# Altium schematic symbol library Schlib1.SchLib: 72 symbols (part 1 of 3)
Pins are listed as number, name and electrical type; pins without a type are passive.

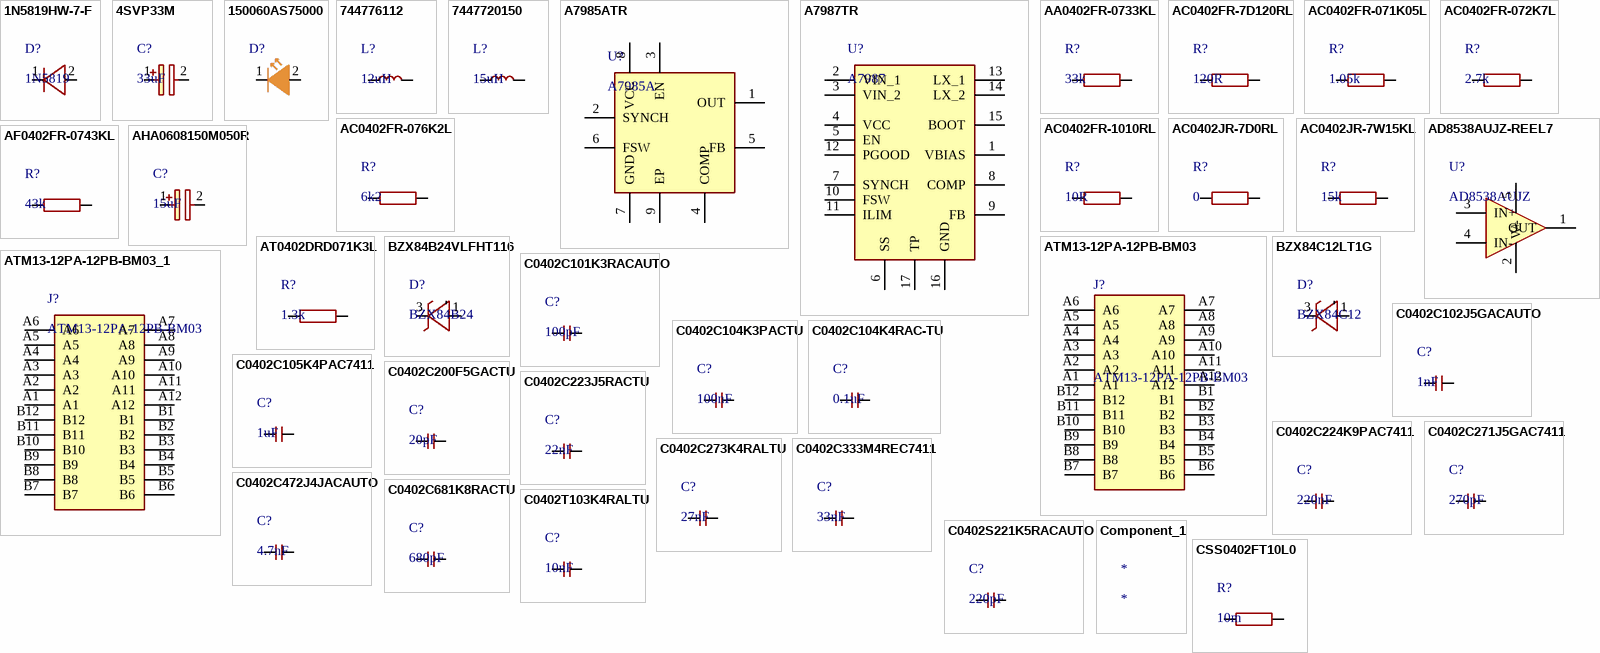
[diagram p0: symbols 1N5819HW-7-F to CSS0402FT10L0]

## 1N5819HW-7-F
designator D?, comment 1N5819
Rectifier Diode, Schottky, 1 Phase, 1 Element, 1A, 40V V(RRM), Silicon; Manufacturer: Diodes; Manufacturer Part Number: 1N5819HW-7-F; Package Body Material: Plastic; Number of Elements: 1; Max Power Dissipation: 450mW; Forward Voltage: 320mV; Non-rep Pk Forward Current-Max: 25A; Time @ Peak Reflow Temperature-Max (s): 40s; Qualification Status: Not Qualified; Supplier: Mouser; Supplier Part Number: 621-1N5819HW-F; RoHS: Yes; Category: Schottky Diodes; Stock: 170615; Pricing: 1=0.25, 10=0.168, 50=0.168, 100=0.121, 1000=0.091, 10000=0.05 (USD); Pins: 2; Diode Element Material: SILICON; Package Shape: Rectangular; Terminal Finish: Tin; Min Operating Temperature: -65°C; Max Operating Temperature: 125°C; Diode Type: RECTIFIER; JESD-30 Code: R-PDSO-G2; Max Output current: 1A; Package Style: SMALL OUTLINEMeter; Rep Pk Reverse Voltage-Max: 40V; Surface Mount: Yes; Technology: SCHOTTKY; Terminal Form: Gull Wing; Terminal Position: DUAL; JESD-609 Code: e3; Moisture Sensitivity Level: 1; Peak Reflow Temperature (Cel): 260°C; Reach SVHC Compliant: Yes; RoHS Compliant: Yes; ComponentLink1URL: https://datasheet.ciiva.com:443/pdfs/VipMasterIC/IC/DIOD/DIOD-S-A0009689747/DIOD-S-A0009691035-1.pdf?src-supplier=IHS+Markit; ComponentLink1Description: https://datasheet.ciiva.com:443/pdfs/VipMasterIC/IC/DIOD/DIOD-S-A0009689747/DIOD-S-A0009691035-1.pdf?src-supplier=IHS+Markit; ComponentLink2URL: https://datasheet.ciiva.com/27092/1538419-27092484.pdf?src-supplier=Jameco; ComponentLink2Description: https://datasheet.ciiva.com/27092/1538419-27092484.pdf?src-supplier=Jameco; ComponentLink3URL: https://datasheet.ciiva.com/16303/ds30217-16303296.pdf?src-supplier=Future+Electronics; ComponentLink3Description: https://datasheet.ciiva.com/16303/ds30217-16303296.pdf?src-supplier=Future+Electronics; ComponentLink4URL: https://datasheet.ciiva.com/1177/ds30217-1177089.pdf?src-supplier=Element14; ComponentLink4Description: https://datasheet.ciiva.com/1177/ds30217-1177089.pdf?src-supplier=Element14; ComponentLink5URL: https://datasheet.ciiva.com/8303/ds30217-8303132.pdf?src-supplier=Avnet; ComponentLink5Description: https://datasheet.ciiva.com/8303/ds30217-8303132.pdf?src-supplier=Avnet; ComponentLink6URL: https://datasheet.ciiva.com/912/ds30217-912802.pdf?src-supplier=Digikey; ComponentLink6Description: https://datasheet.ciiva.com/912/ds30217-912802.pdf?src-supplier=Digikey; ComponentLink7URL: https://datasheet.ciiva.com/912/ds30217-912803.pdf?src-supplier=Digikey; ComponentLink7Description: https://datasheet.ciiva.com/912/ds30217-912803.pdf?src-supplier=Digikey; ComponentLink8URL: https://datasheet.ciiva.com/912/ds30217-912801.pdf?src-supplier=Digikey; ComponentLink8Description: https://datasheet.ciiva.com/912/ds30217-912801.pdf?src-supplier=Digikey
footprint SOD3716X125N
pins: 1 K, 2 A

## 4SVP33M
designator C?, comment 33uF
Aluminum Electrolytic Capacitor, Polarized, Aluminum (solid Polymer), 4V, 20% +Tol, 20% -Tol, 33uF, Surface Mount, 1717; Manufacturer: Panasonic; Manufacturer Part Number: 4SVP33M; Manufacturer Series: SVP; Dielectric Material: Aluminium; ESR (Equivalent Series Resistance): 200mR; Leakage Current: 66uA; Ripple Current: 37mA; Tan Delta: 0.15; Supplier: Mouser; Supplier Part Number: 667-4SVP33M; RoHS: Yes; Category: Aluminum Electrolytic Capacitors; Stock: 1637; Pricing: 1=0.67, 10=0.519, 50=0.519, 100=0.508, 1000=0.44, 10000=0.362 (USD); Mounting Technology: Surface Mount; Pins: 2; Package Shape: Cylindrical; Case/Package: 1717; Min Operating Temperature: -55°C; Max Operating Temperature: 105°C; Polarity: Polarized; Value: 33uF; Capacitor Type: Aluminium; Tolerance  (fill in as +-): 20%; Package Style: SMTMeter; Packaging: Tape and Reel; Tolerance (fill in as +-): 20%; Rated DC Voltage (URdc): 4V; Series: SVP; Termination: Flat; Length: 5mm; Width: 4.3mm; Height: 5.4mm; Reach SVHC Compliant: Yes; RoHS Compliant: Yes; ComponentLink1URL: https://datasheet.ciiva.com:443/pdfs/VipMasterIC/IC/PANA/PANA-S-A0009016943/PANA-S-A0009016943-1.pdf?src-supplier=IHS+Markit; ComponentLink1Description: https://datasheet.ciiva.com:443/pdfs/VipMasterIC/IC/PANA/PANA-S-A0009016943/PANA-S-A0009016943-1.pdf?src-supplier=IHS+Markit; ComponentLink2URL: https://datasheet.ciiva.com/24477/svp-series-datasheet-24477337.pdf?src-supplier=Onlinecomponents.com; ComponentLink2Description: https://datasheet.ciiva.com/24477/svp-series-datasheet-24477337.pdf?src-supplier=Onlinecomponents.com
footprint 10SVPS10M
pins: 1 +, 2

## 150060AS75000
designator D?  (value not drawn)
Single Color LED, Amber, Water Clear, 1.1mm; Manufacturer: Wurth Electronics; Supplier: Digikey; Supplier Part Number: 732-150060AS75000CT-ND; Manufacturer Part Number: 150060AS75000; RoHS: Yes; Category: LEDs; Stock: 19678; Pricing: 1=0.15, 50=0.142, 100=0.122, 500=0.105 (USD); Optoelectronic Device Type: SINGLE COLOR LED; Reach SVHC Compliant: Yes; RoHS Compliant: Yes; ComponentLink1URL: https://datasheet.ciiva.com:443/pdfs/VipMasterIC/IC/MIDC/MIDC-S-A0007768872/MIDC-S-A0007768872-1.pdf?src-supplier=IHS+Markit; ComponentLink1Description: https://datasheet.ciiva.com:443/pdfs/VipMasterIC/IC/MIDC/MIDC-S-A0007768872/MIDC-S-A0007768872-1.pdf?src-supplier=IHS+Markit; ComponentLink2URL: http://www.farnell.com/datasheets/2621639.pdf?src-supplier=Farnell; ComponentLink2Description: http://www.farnell.com/datasheets/2621639.pdf?src-supplier=Farnell; ComponentLink3URL: http://www.farnell.com/datasheets/2621639.pdf?src-supplier=Element14; ComponentLink3Description: http://www.farnell.com/datasheets/2621639.pdf?src-supplier=Element14; ComponentLink4URL: http://www.farnell.com/datasheets/2621639.pdf?src-supplier=Newark; ComponentLink4Description: http://www.farnell.com/datasheets/2621639.pdf?src-supplier=Newark
footprint LED-0603
pins: 1 K, 2 A

## 744776112
designator L?, comment 12uH
General Purpose Inductor, 12uH, 20%, 1 Element, Nickel-zinc Ferrite-Core, SMD, 3935; Manufacturer: Wurth Electronics; Manufacturer Part Number: 744776112; DC Resistance (DCR): 70mR; Inductor Application: POWER INDUCTOR; Channels: 1; Max Current Rating: 2.72A; Shape/Size Description: RECTANGULAR PACKAGE; Shielding: Unshielded; Test Frequency: 1kHz; Self Resonant Frequency: 20MHz; Supplier: Mouser; Supplier Part Number: 710-744776112; RoHS: Yes; Category: Fixed Inductors; Stock: 180; Pricing: 1=2.29, 10=2.22, 50=2.14, 100=2.1, 1000=1.7, 10000=1.7 (USD); Pins: 2; Terminal Finish: Copper; Core Material: Ferrite; Min Operating Temperature: -40°C; Max Operating Temperature: 125°C; Tolerance: 20%; JESD-609 Code: e1; Inductance-Nom (L): 12uH; Inductor Type: GENERAL PURPOSE INDUCTOR; Surface Mount: Yes; Terminal Placement: Dual Ended; Termination: One Surface; Reach SVHC Compliant: Yes; RoHS Compliant: Yes; ComponentLink1URL: https://datasheet.ciiva.com:443/pdfs/VipMasterIC/IC/MIDC/MIDC-S-A0009028210/MIDC-S-A0009028303-1.pdf?src-supplier=IHS+Markit; ComponentLink1Description: https://datasheet.ciiva.com:443/pdfs/VipMasterIC/IC/MIDC/MIDC-S-A0009028210/MIDC-S-A0009028303-1.pdf?src-supplier=IHS+Markit; ComponentLink2URL: https://datasheet.ciiva.com/1063/744776112-1063302.pdf?src-supplier=Digikey; ComponentLink2Description: https://datasheet.ciiva.com/1063/744776112-1063302.pdf?src-supplier=Digikey; ComponentLink3URL: https://datasheet.ciiva.com/6696/744776112-6696301.pdf?src-supplier=Digikey; ComponentLink3Description: https://datasheet.ciiva.com/6696/744776112-6696301.pdf?src-supplier=Digikey; ComponentLink4URL: https://datasheet.ciiva.com/4954/744776112-37936-4954902.pdf?src-supplier=Mouser; ComponentLink4Description: https://datasheet.ciiva.com/4954/744776112-37936-4954902.pdf?src-supplier=Mouser; ComponentLink5URL: https://datasheet.ciiva.com/7892/1736454-7892919.pdf?src-supplier=Element14; ComponentLink5Description: https://datasheet.ciiva.com/7892/1736454-7892919.pdf?src-supplier=Element14; ComponentLink6URL: https://datasheet.ciiva.com/6696/744776112-6696300.pdf?src-supplier=Digikey; ComponentLink6Description: https://datasheet.ciiva.com/6696/744776112-6696300.pdf?src-supplier=Digikey
footprint WE-PD2_105455
pins: 1, 2

## 7447720150
designator L?, comment 15uH
Data Line Filter, 1 Function(s), 2.4A; Manufacturer: Wurth Electronics; Manufacturer Part Number: 7447720150; DC Resistance-Max: 45mR; Channels: 1; Supplier: Mouser; Supplier Part Number: 710-7447720150; RoHS: Yes; Category: Fixed Inductors; Stock: 282; Pricing: 1=1.02, 10=0.969, 50=0.903, 100=0.819, 1000=0.735, 10000=0.732 (USD); Mounting Technology: Through Hole; Terminal Finish: Copper; Min Operating Temperature: -40°C; Max Operating Temperature: 125°C; JESD-609 Code: e2; Filter Type: DATA LINE FILTER; Value: 15uH; Current Rating: 2.4A; Diameter: 7.8mm; Height: 9.5mm; Reach SVHC Compliant: Yes; RoHS Compliant: Yes; ComponentLink1URL: https://datasheet.ciiva.com:443/pdfs/VipMasterIC/IC/MIDC/MIDC-S-A0003256981/MIDC-S-A0003256981-1.pdf?src-supplier=IHS+Markit; ComponentLink1Description: https://datasheet.ciiva.com:443/pdfs/VipMasterIC/IC/MIDC/MIDC-S-A0003256981/MIDC-S-A0003256981-1.pdf?src-supplier=IHS+Markit; ComponentLink2URL: https://datasheet.ciiva.com/23792/1646008-23792069.pdf?src-supplier=Newark; ComponentLink2Description: https://datasheet.ciiva.com/23792/1646008-23792069.pdf?src-supplier=Newark; ComponentLink3URL: https://datasheet.ciiva.com/7695/1736325-7695866.pdf?src-supplier=Element14; ComponentLink3Description: https://datasheet.ciiva.com/7695/1736325-7695866.pdf?src-supplier=Element14; ComponentLink4URL: https://datasheet.ciiva.com/1060/7447720150-1060860.pdf?src-supplier=Digikey; ComponentLink4Description: https://datasheet.ciiva.com/1060/7447720150-1060860.pdf?src-supplier=Digikey
footprint WE-TI_809589
pins: 1, 2

## A7985ATR
designator U?, comment A7985A
Switching Regulator, Voltage-mode, 3.5A, 275kHz Switching Freq-Max, PDSO8; Manufacturer: STMicroelectronics; Manufacturer Part Number: A7985ATR; Package Body Material: Plastic; Package Equivalence Code: SOP8,.25; Control Technique: PULSE WIDTH MODULATION; Max Supply Voltage: 38V; Min Input Voltage: 4.5V; Nominal Supply Voltage: 12V; Channels: 1; Switcher Configuration: BUCK; Qualification Status: Not Qualified; Supplier: Mouser; Supplier Part Number: 511-A7985ATR; RoHS: Yes; Category: Voltage Regulators - Switching; Stock: 5225; Pricing: 1=1.76, 10=1.51, 50=1.42, 100=1.34, 1000=1.24, 10000=1.1 (USD); Case/Package: HLSOP; Pins: 8; Package Shape: Rectangular; Terminal Finish: Tin; Min Operating Temperature: -40°C; Max Operating Temperature: 125°C; Throw Configuration: SWITCHING REGULATOR; Control Mode: VOLTAGE-MODE; JESD-30 Code: R-PDSO-G8; Max Output current: 3.5A; Package Style: SMALL OUTLINE, HEAT SINK/SLUG, LOW PROFILEMeter; Surface Mount: Yes; Frequency: 275kHz; Terminal Form: Gull Wing; Terminal Position: DUAL; JESD-609 Code: e3; Moisture Sensitivity Level: 3; Length: 4.9mm; Width: 3.9mm; Terminal Pitch: 1.27mm; Height - Seated (Max): 1.7mm; Reach SVHC Compliant: Yes; RoHS Compliant: Yes; Temperature Grade: AUTOMOTIVE; ComponentLink1URL: https://datasheet.ciiva.com:443/pdfs/VipMasterIC/IC/SGST/SGST-S-A0002908266/SGST-S-A0002908266-1.pdf?src-supplier=IHS+Markit; ComponentLink1Description: https://datasheet.ciiva.com:443/pdfs/VipMasterIC/IC/SGST/SGST-S-A0002908266/SGST-S-A0002908266-1.pdf?src-supplier=IHS+Markit; ComponentLink2URL: https://datasheet.ciiva.com/41458/001184805-da-01-en-ic-reg-buck-adj-2a-a7985atr-soic-8-stm-41458161.pdf?src-supplier=Conrad; ComponentLink2Description: https://datasheet.ciiva.com/41458/001184805-da-01-en-ic-reg-buck-adj-2a-a7985atr-soic-8-stm-41458161.pdf?src-supplier=Conrad; ComponentLink3URL: https://datasheet.ciiva.com/6603/dm00053375-6603398.pdf?src-supplier=Digikey; ComponentLink3Description: https://datasheet.ciiva.com/6603/dm00053375-6603398.pdf?src-supplier=Digikey; ComponentLink4URL: https://datasheet.ciiva.com/6603/dm00053375-6603399.pdf?src-supplier=Digikey; ComponentLink4Description: https://datasheet.ciiva.com/6603/dm00053375-6603399.pdf?src-supplier=Digikey; ComponentLink5URL: https://datasheet.ciiva.com/6603/dm00053375-6603401.pdf?src-supplier=Digikey; ComponentLink5Description: https://datasheet.ciiva.com/6603/dm00053375-6603401.pdf?src-supplier=Digikey
footprint SOIC127P600X170-9N
pins: 1 OUT, 2 SYNCH, 3 EN, 4 COMP, 5 FB, 6 FSW, 7 GND, 8 VCC, 9 EP

## A7987TR
designator U?, comment A7987
Switching Regulator, Voltage-mode, 4.4A, 1650kHz Switching Freq-Max, PDSO16; Manufacturer: STMicroelectronics; Manufacturer Part Number: A7987TR; Supplier: Mouser; Supplier Part Number: 511-A7987TR; RoHS: Yes; Category: Voltage Regulators - Switching; Stock: 4709; Pricing: 1=5.04, 10=3.84, 50=3.54, 100=3.21, 1000=2.88, 10000=2.58 (USD); RoHS Compliant: Yes; ComponentLink1URL: https://www.st.com/resource/en/datasheet/a7987.pdf?src-supplier=Digikey; ComponentLink1Description: https://www.st.com/resource/en/datasheet/a7987.pdf?src-supplier=Digikey; ComponentLink2URL: https://datasheet.octopart.com/A7987TR-STMicroelectronics-datasheet-153441496.pdf?src-supplier=Element14; ComponentLink2Description: https://datasheet.octopart.com/A7987TR-STMicroelectronics-datasheet-153441496.pdf?src-supplier=Element14
footprint SOP65P640X120-17N
pins: 1 VBIAS, 2 VIN_1, 3 VIN_2, 4 VCC, 5 EN, 6 SS, 7 SYNCH, 8 COMP, 9 FB, 10 FSW, 11 ILIM, 12 PGOOD, 13 LX_1, 14 LX_2, 15 BOOT, 16 GND, 17 TP

## AA0402FR-0733KL
designator R?, comment 33k
Fixed Resistor, Metal Glaze/thick Film, 0.0625W, 33000ohm, 50V, 1% +/-Tol, 150ppm/Cel, Surface Mount, 0402; Manufacturer: Yageo; Manufacturer Part Number: AA0402FR-0733KL; Additional Feature: LASER TRIMMABLE; Power: 62.5mW; Rated Temperature: 70°C; Value: 33kR; Temperature Coefficient (ppm/Cel): 150; Package Height: 0.32mm; Package Length: 1mm; Package Width: 0.5mm; Reference Standard: AEC-Q200; Supplier: Mouser; Supplier Part Number: 603-AA0402FR-0733KL; RoHS: Yes; Category: Chip SMD Resistors; Stock: 7647; Pricing: 1=0.11, 10=0.019, 50=0.019, 100=0.017, 1000=0.013, 10000=0.005 (USD); Mounting Technology: Surface Mount; Pins: 2; Package Shape: Rectangular; Case/Package: 0402; Terminal Finish: Nickel; Min Operating Temperature: -55°C; Max Operating Temperature: 155°C; Tolerance: 1%; JESD-609 Code: e3; Resistor Type: FIXED RESISTOR; Construction: Chip; Packaging: Tape and Reel; Technology: METAL GLAZE/THICK FILM; Termination: Wraparound; Working Voltage: 50V; Reach SVHC Compliant: Yes; RoHS Compliant: Yes; ComponentLink1URL: https://datasheet.ciiva.com:443/pdfs/VipMasterIC/IC/YAGO/YAGO-S-A0003674169/YAGO-S-A0003674169-1.pdf?src-supplier=IHS+Markit; ComponentLink1Description: https://datasheet.ciiva.com:443/pdfs/VipMasterIC/IC/YAGO/YAGO-S-A0003674169/YAGO-S-A0003674169-1.pdf?src-supplier=IHS+Markit; ComponentLink2URL: http://www.yageo.com/NewPortal/yageodocoutput?fileName=/pdf/R-Chip/PYu-AA_51_RoHS_L_3.pdf&src-supplier=Digikey; ComponentLink2Description: http://www.yageo.com/NewPortal/yageodocoutput?fileName=/pdf/R-Chip/PYu-AA_51_RoHS_L_3.pdf&src-supplier=Digikey
footprint R0402
pins: 1, 2

## AC0402FR-7D120RL
designator R?, comment 120R
Fixed Resistor, Metal Glaze/thick Film, 0.0625W, 120ohm, 50V, 1% +/-Tol, -100,100ppm/Cel, 0402; Manufacturer: Yageo; Manufacturer Part Number: AC0402FR-7D120RL; Power: 62.5mW; Package Height: 0.32mm; Package Length: 1mm; Package Width: 0.5mm; Reference Standard: AEC-Q200; Supplier: Mouser; Supplier Part Number: 603-AC0402FR-7D120RL; RoHS: Yes; Category: Chip SMD Resistors; Stock: 13078; Pricing: 1=0.14, 10=0.014, 50=0.014, 100=0.009, 1000=0.008, 10000=0.004 (USD); Pins: 2; Case/Package: 0402; Terminal Finish: Nickel; Min Operating Temperature: -55°C; Max Operating Temperature: 155°C; Tolerance: 1%; JESD-609 Code: e3; Resistor Type: FIXED RESISTOR; Construction: Chip; Packaging: Tape and Reel; Value: 120R; Series: AC; Technology: METAL GLAZE/THICK FILM; Working Voltage: 50V; Temperature Coefficient (ppm/Cel): -100,100; Reach SVHC Compliant: Yes; RoHS Compliant: Yes; ComponentLink1URL: https://datasheet.ciiva.com:443/pdfs/VipMasterIC/IC/YAGO/YAGOS02581/YAGOS02581-1.pdf?src-supplier=IHS+Markit; ComponentLink1Description: https://datasheet.ciiva.com:443/pdfs/VipMasterIC/IC/YAGO/YAGOS02581/YAGOS02581-1.pdf?src-supplier=IHS+Markit
footprint R0402
pins: 1, 2

## AC0402FR-071K05L
designator R?, comment 1.05k
Fixed Resistor, Metal Glaze/thick Film, 0.0625W, 1050ohm, 50V, 1% +/-Tol, 100ppm/Cel, Surface Mount, 0402; Manufacturer: Yageo; Manufacturer Part Number: AC0402FR-071K05L; Additional Feature: LASER TRIMMABLE; Power: 62.5mW; Rated Temperature: 70°C; Value: 1.05kR; Temperature Coefficient (ppm/Cel): 100; Package Height: 0.32mm; Package Length: 1mm; Package Width: 0.5mm; Reference Standard: AEC-Q200; Supplier: Mouser; Supplier Part Number: 603-AC0402FR-071K05L; RoHS: Yes; Category: Chip SMD Resistors; Stock: 33067; Pricing: 1=0.1, 10=0.005, 50=0.005, 100=0.005, 1000=0.005, 10000=0.002 (USD); Mounting Technology: Surface Mount; Pins: 2; Package Shape: Rectangular; Case/Package: 0402; Terminal Finish: Nickel; Min Operating Temperature: -55°C; Max Operating Temperature: 155°C; Tolerance: 1%; JESD-609 Code: e3; Resistor Type: FIXED RESISTOR; Construction: Chip; Packaging: Tape and Reel; Technology: METAL GLAZE/THICK FILM; Termination: Wraparound; Working Voltage: 50V; Reach SVHC Compliant: Yes; RoHS Compliant: Yes; ComponentLink1URL: https://datasheet.ciiva.com:443/pdfs/VipMasterIC/IC/YAGO/YAGO-S-A0003597364/YAGO-S-A0003597364-1.pdf?src-supplier=IHS+Markit; ComponentLink1Description: https://datasheet.ciiva.com:443/pdfs/VipMasterIC/IC/YAGO/YAGO-S-A0003597364/YAGO-S-A0003597364-1.pdf?src-supplier=IHS+Markit; ComponentLink2URL: http://www.yageo.com/NewPortal/yageodocoutput?fileName=/pdf/R-Chip/PYu-AC_51_RoHS_L_6.pdf&src-supplier=Digikey; ComponentLink2Description: http://www.yageo.com/NewPortal/yageodocoutput?fileName=/pdf/R-Chip/PYu-AC_51_RoHS_L_6.pdf&src-supplier=Digikey
footprint R0402
pins: 1, 2

## AC0402FR-072K7L
designator R?, comment 2.7k
Fixed Resistor, Metal Glaze/thick Film, 0.0625W, 2700ohm, 50V, 1% +/-Tol, 100ppm/Cel, Surface Mount, 0402; Manufacturer: Yageo; Manufacturer Part Number: AC0402FR-072K7L; Additional Feature: LASER TRIMMABLE; Power: 62.5mW; Rated Temperature: 70°C; Value: 2.7kR; Temperature Coefficient (ppm/Cel): 100; Package Height: 0.32mm; Package Length: 1mm; Package Width: 0.5mm; Reference Standard: AEC-Q200; Supplier: Mouser; Supplier Part Number: 603-AC0402FR-072K7L; RoHS: Yes; Category: Chip SMD Resistors; Stock: 89734; Pricing: 1=0.1, 10=0.009, 50=0.009, 100=0.007, 1000=0.005, 10000=0.002 (USD); Mounting Technology: Surface Mount; Pins: 2; Package Shape: Rectangular; Case/Package: 0402; Terminal Finish: Nickel; Min Operating Temperature: -55°C; Max Operating Temperature: 155°C; Tolerance: 1%; JESD-609 Code: e3; Resistor Type: FIXED RESISTOR; Construction: Chip; Packaging: Tape and Reel; Technology: METAL GLAZE/THICK FILM; Termination: Wraparound; Working Voltage: 50V; Reach SVHC Compliant: Yes; RoHS Compliant: Yes; ComponentLink1URL: https://datasheet.ciiva.com:443/pdfs/VipMasterIC/IC/YAGO/YAGO-S-A0003597364/YAGO-S-A0003597364-1.pdf?src-supplier=IHS+Markit; ComponentLink1Description: https://datasheet.ciiva.com:443/pdfs/VipMasterIC/IC/YAGO/YAGO-S-A0003597364/YAGO-S-A0003597364-1.pdf?src-supplier=IHS+Markit; ComponentLink2URL: https://datasheet.ciiva.com/12576/pyu-ac-51-rohs-l-2-12576316.pdf?src-supplier=Mouser; ComponentLink2Description: https://datasheet.ciiva.com/12576/pyu-ac-51-rohs-l-2-12576316.pdf?src-supplier=Mouser
footprint R0402
pins: 1, 2

## AC0402FR-076K2L
designator R?, comment 6k2
Fixed Resistor, Metal Glaze/thick Film, 0.0625W, 6200ohm, 50V, 1% +/-Tol, 100ppm/Cel, Surface Mount, 0402; Manufacturer: Yageo; Manufacturer Part Number: AC0402FR-076K2L; Additional Feature: LASER TRIMMABLE; Power: 62.5mW; Rated Temperature: 70°C; Value: 6.2kR; Temperature Coefficient (ppm/Cel): 100; Package Height: 0.32mm; Package Length: 1mm; Package Width: 0.5mm; Reference Standard: AEC-Q200; Supplier: Mouser; Supplier Part Number: 603-AC0402FR-076K2L; RoHS: Yes; Category: Chip SMD Resistors; Stock: 418682; Pricing: 1=0.1, 10=0.009, 50=0.009, 100=0.007, 1000=0.006, 10000=0.002 (USD); Mounting Technology: Surface Mount; Pins: 2; Package Shape: Rectangular; Case/Package: 0402; Terminal Finish: Nickel; Min Operating Temperature: -55°C; Max Operating Temperature: 155°C; Tolerance: 1%; JESD-609 Code: e3; Resistor Type: FIXED RESISTOR; Construction: Chip; Packaging: Tape and Reel; Technology: METAL GLAZE/THICK FILM; Termination: Wraparound; Working Voltage: 50V; Reach SVHC Compliant: Yes; RoHS Compliant: Yes; ComponentLink1URL: https://datasheet.ciiva.com:443/pdfs/VipMasterIC/IC/YAGO/YAGO-S-A0003597364/YAGO-S-A0003597364-1.pdf?src-supplier=IHS+Markit; ComponentLink1Description: https://datasheet.ciiva.com:443/pdfs/VipMasterIC/IC/YAGO/YAGO-S-A0003597364/YAGO-S-A0003597364-1.pdf?src-supplier=IHS+Markit; ComponentLink2URL: https://datasheet.octopart.com/AC0402FR-076K2L-Yageo-datasheet-151884373.pdf?src-supplier=Future+Electronics; ComponentLink2Description: https://datasheet.octopart.com/AC0402FR-076K2L-Yageo-datasheet-151884373.pdf?src-supplier=Future+Electronics; ComponentLink3URL: http://www.yageo.com/NewPortal/yageodocoutput?fileName=/pdf/R-Chip/PYu-AC_51_RoHS_L_6.pdf&src-supplier=Digikey; ComponentLink3Description: http://www.yageo.com/NewPortal/yageodocoutput?fileName=/pdf/R-Chip/PYu-AC_51_RoHS_L_6.pdf&src-supplier=Digikey; ComponentLink4URL: https://www.yageo.com/upload/media/product/productsearch/datasheet/rchip/PYu-AC_51_RoHS_L_7.pdf?src-supplier=Digikey; ComponentLink4Description: https://www.yageo.com/upload/media/product/productsearch/datasheet/rchip/PYu-AC_51_RoHS_L_7.pdf?src-supplier=Digikey; ComponentLink5URL: http://www.yageo.com/documents/recent/PYu-AC_51_RoHS_L_2_revised.pdf?src-supplier=Future+Electronics; ComponentLink5Description: http://www.yageo.com/documents/recent/PYu-AC_51_RoHS_L_2_revised.pdf?src-supplier=Future+Electronics
footprint R0402
pins: 1, 2

## AC0402FR-1010RL
designator R?, comment 10R
Fixed Resistor, Metal Glaze/thick Film, 0.0625W, 10ohm, 50V, 1% +/-Tol, 200ppm/Cel, Surface Mount, 0402; Manufacturer: Yageo; Manufacturer Part Number: AC0402FR-1010RL; Additional Feature: LASER TRIMMABLE; Power: 62.5mW; Rated Temperature: 70°C; Temperature Coefficient (ppm/Cel): 200; Package Height: 0.32mm; Package Length: 1mm; Package Width: 0.5mm; Reference Standard: AEC-Q200; Supplier: Mouser; Supplier Part Number: 603-AC0402FR-1010RL; RoHS: Yes; Category: Chip SMD Resistors; Stock: 136743; Pricing: 1=0.18, 10=0.018, 50=0.018, 100=0.012, 1000=0.01, 10000=0.005 (USD); Mounting Technology: Surface Mount; Pins: 2; Package Shape: Rectangular; Case/Package: 0402; Terminal Finish: Nickel; Min Operating Temperature: -55°C; Max Operating Temperature: 155°C; Tolerance: 1%; JESD-609 Code: e3; Resistor Type: FIXED RESISTOR; Construction: Chip; Packaging: Tape and Reel; Value: 10R; Technology: METAL GLAZE/THICK FILM; Termination: Wraparound; Working Voltage: 50V; Reach SVHC Compliant: Yes; RoHS Compliant: Yes; ComponentLink1URL: https://datasheet.ciiva.com:443/pdfs/VipMasterIC/IC/YAGO/YAGO-S-A0003597364/YAGO-S-A0003597364-1.pdf?src-supplier=IHS+Markit; ComponentLink1Description: https://datasheet.ciiva.com:443/pdfs/VipMasterIC/IC/YAGO/YAGO-S-A0003597364/YAGO-S-A0003597364-1.pdf?src-supplier=IHS+Markit
footprint R0402
pins: 1, 2

## AC0402JR-7D0RL
designator R?, comment 0
Fixed Resistor, Metal Glaze/thick Film, 0.0625W, 0ohm, Surface Mount, 0402; Manufacturer: Yageo; Manufacturer Part Number: AC0402JR-7D0RL; Supplier: Mouser; Supplier Part Number: 603-AC0402JR-7D0RL; RoHS: Yes; Category: Resistors; Stock: 155617; Pricing: 1=0.14, 10=0.014, 50=0.014, 100=0.009, 1000=0.008, 10000=0.004 (USD)
footprint R0402
pins: 1, 2

## AC0402JR-7W15KL
designator R?, comment 15k
Chip Resistor Automotive Grade Thick Film 0402 15kOhm 5% Paper T/R; Manufacturer: Yageo; Manufacturer Part Number: AC0402JR-7W15KL; Supplier: Mouser; Supplier Part Number: 603-AC0402JR-7W15KL; RoHS: No; Category: Chip SMD Resistors; Stock: 9990; Pricing: 1=0.15, 10=0.015, 50=0.015, 100=0.01, 1000=0.008, 10000=0.003 (USD)
footprint R0402
pins: 1, 2

## AD8538AUJZ-REEL7
designator U?, comment AD8538AUJZ
Operational Amplifier, 1 Func, 30uV Offset-Max, CMOS, PDSO5; Manufacturer: Analog Devices; Manufacturer Part Number: AD8538AUJZ-REEL7; Package Body Material: Plastic; Architecture: VOLTAGE-FEEDBACK; Average Bias Current-Max (IIB): 100pA; Bias Current-Max (IIB) @25C: 25pA; Common-mode Reject Ratio-Nom: 135dB; Frequency Compensation: YES; Neg Supply Voltage Limit-Max: 0V; Channels: 1; Package Equivalence Code: TSOP5/6,.11,37; Power: No; Power Supplies: +-1.35/+-2.5/2.7/5V; Slew Rate: 0.4V/µs; Max Supply Current: 215uA; Supply Voltage Limit-Max: 6V; Nominal Supply Voltage: 5V; Time @ Peak Reflow Temperature-Max (s): 40s; Unity Gain BW-Nom: 430kHz; Voltage Gain-Min: 178000; Qualification Status: Not Qualified; Supplier: Mouser; Supplier Part Number: 584-AD8538AUJZ-R7; RoHS: Yes; Category: Amplifiers - Op Amps, Buffer, Instrumentation; Stock: 130448; Pricing: 1=1.65, 10=1.42, 50=1.42, 100=1.25, 1000=0.916, 10000=0.84 (USD); Case/Package: VSSOP; Pins: 5; Package Shape: Rectangular; Terminal Finish: Tin; Min Operating Temperature: -40°C; Max Operating Temperature: 125°C; JESD-609 Code: e3; Amplifier Type: OPERATIONAL AMPLIFIER; Input Offset Voltage-Max: 30uV; JESD-30 Code: R-PDSO-G5; Low-Bias: Yes; Low-Offset: Yes; Micropower: Yes; Moisture Sensitivity Level: 1; Neg Supply Voltage-Nom (Vsup): 0V; Package Style: SMALL OUTLINE, VERY THIN PROFILE, SHRINK PITCHMeter; Packaging: Tape and Reel; Peak Reflow Temperature (Cel): 260°C; Programmable Power: No; Surface Mount: Yes; Technology: CMOS; Terminal Form: Gull Wing; Terminal Position: DUAL; Wideband: No; Length: 2.9mm; Width: 1.6mm; Height - Seated (Max): 1mm; Terminal Pitch: 0.95mm; Temperature Grade: AUTOMOTIVE; Reach SVHC Compliant: Yes; RoHS Compliant: Yes; ComponentLink1URL: https://datasheet.ciiva.com:443/pdfs/VipMasterIC/IC/ANDI/ANDIS13894/ANDIS13894-1.pdf?src-supplier=IHS+Markit; ComponentLink1Description: https://datasheet.ciiva.com:443/pdfs/VipMasterIC/IC/ANDI/ANDIS13894/ANDIS13894-1.pdf?src-supplier=IHS+Markit; ComponentLink2URL: https://datasheet.ciiva.com/15374/ad8538-8539-243268-15374656.pdf?src-supplier=Mouser; ComponentLink2Description: https://datasheet.ciiva.com/15374/ad8538-8539-243268-15374656.pdf?src-supplier=Mouser; ComponentLink3URL: https://datasheet.ciiva.com/2974/ad8538-8539-2974672.pdf?src-supplier=Avnet; ComponentLink3Description: https://datasheet.ciiva.com/2974/ad8538-8539-2974672.pdf?src-supplier=Avnet; ComponentLink4URL: https://datasheet.ciiva.com/1793/ad8538-8539-1793940.pdf?src-supplier=Digikey; ComponentLink4Description: https://datasheet.ciiva.com/1793/ad8538-8539-1793940.pdf?src-supplier=Digikey; ComponentLink5URL: https://datasheet.ciiva.com/1793/ad8538-8539-1793941.pdf?src-supplier=Digikey; ComponentLink5Description: https://datasheet.ciiva.com/1793/ad8538-8539-1793941.pdf?src-supplier=Digikey; ComponentLink6URL: https://datasheet.ciiva.com/1793/ad8538-8539-1793942.pdf?src-supplier=Digikey; ComponentLink6Description: https://datasheet.ciiva.com/1793/ad8538-8539-1793942.pdf?src-supplier=Digikey; ComponentLink7URL: https://datasheet.ciiva.com/2973/ad8538-8539-2973062.pdf?src-supplier=Avnet; ComponentLink7Description: https://datasheet.ciiva.com/2973/ad8538-8539-2973062.pdf?src-supplier=Avnet
footprint SOT95P280X100-5N
pins: 1 OUT, 2 V-, 3 IN+, 4 IN-, 5 V+

## AF0402FR-0743KL
designator R?, comment 43k
Fixed Resistor, Metal Glaze/thick Film, 0.0625W, 43000ohm, 50V, 1% +/-Tol, 100ppm/Cel, Surface Mount, 0402; Manufacturer: Yageo; Manufacturer Part Number: AF0402FR-0743KL; Additional Feature: ANTI-SULFUR; Power: 62.5mW; Rated Temperature: 70°C; Value: 43kR; Temperature Coefficient (ppm/Cel): 100; Package Height: 0.32mm; Package Length: 1mm; Package Width: 0.5mm; Reference Standard: AEC-Q200; Supplier: Mouser; Supplier Part Number: 603-AF0402FR-0743KL; RoHS: Yes; Category: Chip SMD Resistors; Stock: 9222; Pricing: 1=0.1, 10=0.022, 50=0.022, 100=0.016, 1000=0.012, 10000=0.006 (USD); Mounting Technology: Surface Mount; Pins: 2; Case/Package: 0402; Min Operating Temperature: -55°C; Max Operating Temperature: 155°C; Tolerance: 1%; Resistor Type: FIXED RESISTOR; Construction: Rectangular; Packaging: Tape and Reel; Termination: Wraparound; Working Voltage: 50V; Reach SVHC Compliant: Yes; RoHS Compliant: Yes; ComponentLink1URL: https://datasheet.ciiva.com:443/pdfs/VipMasterIC/IC/YAGO/YAGO-S-A0009016998/YAGO-S-A0009016998-1.pdf?src-supplier=IHS+Markit; ComponentLink1Description: https://datasheet.ciiva.com:443/pdfs/VipMasterIC/IC/YAGO/YAGO-S-A0009016998/YAGO-S-A0009016998-1.pdf?src-supplier=IHS+Markit; ComponentLink2URL: http://www.yageo.com/documents/recent/PYu-AF_51_RoHS_L_5.pdf?src-supplier=Digikey; ComponentLink2Description: http://www.yageo.com/documents/recent/PYu-AF_51_RoHS_L_5.pdf?src-supplier=Digikey
footprint R0402
pins: 1, 2

## AHA0608150M050R
designator C?, comment 15uF
Hybrid Aluminum V-Chip, 15uF, 50V | AVX AHA0608150M050R; Manufacturer: Kyocera AVX; Supplier: Mouser; Supplier Part Number: 581-AHA0608150M050R; Manufacturer Part Number: AHA0608150M050R; RoHS: No; Category: Polymer Capacitors; Stock: 134; Pricing: 1=0.93, 10=0.586, 50=0.586, 100=0.582, 1000=0.494, 10000=0.262 (USD)
footprint CAPAE660X850N
pins: 1 +, 2

## AT0402DRD071K3L
designator R?, comment 1.3k
Fixed Resistor, Thin Film, 0.0625W, 1300ohm, 50V, 0.5% +/-Tol, 25ppm/Cel, Surface Mount, 0402; Manufacturer: Yageo; Manufacturer Part Number: AT0402DRD071K3L; Additional Feature: HIGH PRECISION; Power: 62.5mW; Rated Temperature: 70°C; Value: 1.3kR; Temperature Coefficient (ppm/Cel): 25; Package Height: 0.3mm; Package Length: 1mm; Package Width: 0.5mm; Reference Standard: AEC-Q200; Supplier: Mouser; Supplier Part Number: 603-AT0402DRD071K3L; RoHS: Yes; Category: Chip SMD Resistors; Stock: 5742; Pricing: 1=0.14, 10=0.102, 50=0.082, 100=0.073, 1000=0.05, 10000=0.031 (USD); Mounting Technology: Surface Mount; Pins: 2; Package Shape: Rectangular; Case/Package: 0402; Min Operating Temperature: -55°C; Max Operating Temperature: 155°C; Tolerance: 0.5%; Resistor Type: FIXED RESISTOR; Construction: Chip; Packaging: Tape and Reel; Technology: THIN FILM; Termination: Wraparound; Working Voltage: 50V; Reach SVHC Compliant: Yes; RoHS Compliant: Yes; ComponentLink1URL: https://datasheet.ciiva.com:443/pdfs/VipMasterIC/IC/YAGO/YAGO-S-A0003527576/YAGO-S-A0003527576-1.pdf?src-supplier=IHS+Markit; ComponentLink1Description: https://datasheet.ciiva.com:443/pdfs/VipMasterIC/IC/YAGO/YAGO-S-A0003527576/YAGO-S-A0003527576-1.pdf?src-supplier=IHS+Markit; ComponentLink2URL: http://www.yageo.com/documents/recent/PYu-AT_51_RoHS_L-3.pdf?src-supplier=Digikey; ComponentLink2Description: http://www.yageo.com/documents/recent/PYu-AT_51_RoHS_L-3.pdf?src-supplier=Digikey
footprint R0402
pins: 1, 2

## ATM13-12PA-12PB-BM03
designator J?
AMPHENOL SINE/TUCHEL - ATM13-12PA-12PB-BM03 - ATM HEADER  (2) 12 POSITION SIZE 20, A&B KEY  - TIN PLATING 98AC7190; Geometry.Height: 35.4mm; Manufacturer_Name: Amphenol; Manufacturer_Part_Number: ATM13-12PA-12PB-BM03; Mouser Part Number: 654-ATM1312A12PBBM03; Mouser Price/Stock: https://www.mouser.co.uk/ProductDetail/Amphenol-SINE-Systems/ATM13-12PA-12PB-BM03?qs=9r4v7xj2Lnmhl8rtozcZiQ%3D%3D; Arrow Part Number: ATM13-12PA-12PB-BM03; Arrow Price/Stock: https://www.arrow.com/en/products/atm13-12pa-12pb-bm03/amphenol?region=nac; Datasheet Link: http://www.amphenol-sine.com/pdf/datasheet/ATM13-12PA-12PB-BM03.pdf
footprint ATM1312PA12PBBM03
pins: A1, A2, A3, A4, A5, A6, A7, A8, A9, A10, A11, A12, B1, B2, B3, B4, B5, B6, B7, B8, B9, B10, B11, B12

## ATM13-12PA-12PB-BM03_1
designator J?, comment ATM13-12PA-12PB-BM03
Combination Line Connector; Manufacturer: Amphenol Sine Systems; Supplier: Mouser; Supplier Part Number: 654-ATM1312A12PBBM03; Manufacturer Part Number: ATM13-12PA-12PB-BM03; RoHS: Yes; Category: Headers and Wire Housings; Stock: 2855; Pricing: 1=18.84, 10=15.36, 50=13.32, 100=13.32, 1000=11.73, 10000=11.73 (USD); Reach SVHC Compliant: Yes; ComponentLink1URL: https://datasheet.ciiva.com:443/pdfs/VipMasterIC/IC/AMPH/AMPH-S-A0002528942/AMPH-S-A0007916446-1.pdf?src-supplier=IHS+Markit; ComponentLink1Description: https://datasheet.ciiva.com:443/pdfs/VipMasterIC/IC/AMPH/AMPH-S-A0002528942/AMPH-S-A0007916446-1.pdf?src-supplier=IHS+Markit; ComponentLink2URL: https://media.digikey.com/pdf/Data%20Sheets/Amphenol%20PDFs/ArmorIPX-Flyer-2019.pdf?src-supplier=Digikey; ComponentLink2Description: https://media.digikey.com/pdf/Data%20Sheets/Amphenol%20PDFs/ArmorIPX-Flyer-2019.pdf?src-supplier=Digikey
footprint ATM1312PA12PBBM03
pins: A1, A2, A3, A4, A5, A6, A7, A8, A9, A10, A11, A12, B1, B2, B3, B4, B5, B6, B7, B8, B9, B10, B11, B12

## BZX84B24VLFHT116
designator D?, comment BZX84B24
Zener Diode, 24V V(Z), 2.08%, 0.25W, Silicon, Unidirectional
footprint TRANS_BZX84_ROM-M
pins: 1 A, 2 NC, 3 K

## BZX84C12LT1G
designator D?, comment BZX84C12
Zener Diode, 12V V(Z), 5.39%, 0.25W, Silicon, Unidirectional, TO-236AB; Manufacturer: ON Semiconductor; Manufacturer Part Number: BZX84C12LT1G; Package Body Material: Plastic; Dynamic Impedance-Max: 25R; Number of Elements: 1; Max Power Dissipation: 250mW; Test Current: 5mA; Additional Feature: UL RECOGNIZED; Time @ Peak Reflow Temperature-Max (s): 40s; Qualification Status: Not Qualified; Supplier: Mouser; Supplier Part Number: 863-BZX84C12LT1G; RoHS: Yes; Category: Zener Diodes; Stock: 46689; Pricing: 1=0.1, 10=0.057, 50=0.057, 100=0.027, 1000=0.026, 10000=0.012 (USD); Pins: 3; Diode Element Material: SILICON; Package Shape: Rectangular; Terminal Finish: Tin; Min Operating Temperature: -65°C; Max Operating Temperature: 150°C; Diode Type: ZENER; Reference Voltage-Nom: 12V; Surface Mount: Yes; Voltage Tol-Max: 5.39%; JESD-609 Code: e3; Polarity: Unidirectional; JESD-30 Code: R-PDSO-G3; Moisture Sensitivity Level: 1; Package Style: SMALL OUTLINEMeter; Technology: ZENER; Terminal Form: Gull Wing; Terminal Position: DUAL; Peak Reflow Temperature (Cel): 260°C; RoHS Compliant: Yes; Reach SVHC Compliant: Yes; JEDEC-95 Code: TO-236AB; ComponentLink1URL: https://datasheet.ciiva.com:443/pdfs/VipMasterIC/IC/ONSM/ONSM-S-A0002809012/ONSM-S-A0002809012-1.pdf?src-supplier=IHS+Markit; ComponentLink1Description: https://datasheet.ciiva.com:443/pdfs/VipMasterIC/IC/ONSM/ONSM-S-A0002809012/ONSM-S-A0002809012-1.pdf?src-supplier=IHS+Markit; ComponentLink2URL: https://datasheet.ciiva.com/39121/2010827-39121645.pdf?src-supplier=Jameco; ComponentLink2Description: https://datasheet.ciiva.com/39121/2010827-39121645.pdf?src-supplier=Jameco; ComponentLink3URL: https://datasheet.ciiva.com/15141/getdatasheetpartid-38645-15141985.pdf?src-supplier=Verical; ComponentLink3Description: https://datasheet.ciiva.com/15141/getdatasheetpartid-38645-15141985.pdf?src-supplier=Verical; ComponentLink4URL: https://datasheet.ciiva.com/8026/bzx84c2v4lt1-d-8026969.pdf?src-supplier=Element14; ComponentLink4Description: https://datasheet.ciiva.com/8026/bzx84c2v4lt1-d-8026969.pdf?src-supplier=Element14; ComponentLink5URL: https://datasheet.ciiva.com/8026/bzx84c2v4lt1-d-8026970.pdf?src-supplier=Element14; ComponentLink5Description: https://datasheet.ciiva.com/8026/bzx84c2v4lt1-d-8026970.pdf?src-supplier=Element14; ComponentLink6URL: https://datasheet.ciiva.com/18434/70100187-18434894.pdf?src-supplier=Allied+Electronics; ComponentLink6Description: https://datasheet.ciiva.com/18434/70100187-18434894.pdf?src-supplier=Allied+Electronics; ComponentLink7URL: https://datasheet.ciiva.com/8345/bzx84c2v4lt1-d-8345784.pdf?src-supplier=Avnet; ComponentLink7Description: https://datasheet.ciiva.com/8345/bzx84c2v4lt1-d-8345784.pdf?src-supplier=Avnet; ComponentLink8URL: https://datasheet.ciiva.com/8345/bzx84c2v4lt1-d-8345788.pdf?src-supplier=Avnet; ComponentLink8Description: https://datasheet.ciiva.com/8345/bzx84c2v4lt1-d-8345788.pdf?src-supplier=Avnet; ComponentLink9URL: https://datasheet.ciiva.com/894/bzx84c2v4lt1-d-894702.pdf?src-supplier=Digikey; ComponentLink9Description: https://datasheet.ciiva.com/894/bzx84c2v4lt1-d-894702.pdf?src-supplier=Digikey; ComponentLink10URL: https://datasheet.ciiva.com/894/bzx84c2v4lt1-d-894703.pdf?src-supplier=Digikey; ComponentLink10Description: https://datasheet.ciiva.com/894/bzx84c2v4lt1-d-894703.pdf?src-supplier=Digikey; ComponentLink11URL: https://datasheet.ciiva.com/894/bzx84c2v4lt1-d-894701.pdf?src-supplier=Digikey; ComponentLink11Description: https://datasheet.ciiva.com/894/bzx84c2v4lt1-d-894701.pdf?src-supplier=Digikey
footprint SOT96P237X111-3N
pins: 1 A, 2 NC, 3 K

## C0402C101K3RACAUTO
designator C?, comment 100pF
Multilayer Ceramic Capacitors MLCC - SMD/SMT 25V 100pF X7R 0402 10% AEC-Q200; Manufacturer: KEMET; Manufacturer Part Number: C0402C101K3RACAUTO; Supplier: Mouser; Supplier Part Number: 80-C0402C101K3RAUTO; RoHS: No; Category: Ceramic Capacitors; Stock: 198813; Pricing: 1=0.1, 10=0.046, 50=0.046, 100=0.028, 1000=0.02, 10000=0.013 (USD)
footprint C0402
pins: 1, 2

## C0402C102J5GACAUTO
designator C?, comment 1nF
Ceramic Capacitor, Multilayer, Ceramic, 50V, 5% +Tol, 5% -Tol, C0G, 30ppm/Cel TC, 0.001uF, Surface Mount, 0402; Manufacturer: KEMET; Manufacturer Part Number: C0402C102J5GACAUTO; Multilayer: Yes; Reference Standard: AEC-Q200; Supplier: Mouser; Supplier Part Number: 80-C0402C102J5GAUTO; RoHS: Yes; Category: Ceramic Capacitors; Stock: 231451; Pricing: 1=0.12, 10=0.048, 50=0.048, 100=0.032, 1000=0.024, 10000=0.019 (USD); Mounting Technology: Surface Mount; Pins: 2; Terminal Finish: Nickel; Dielectric Material: Ceramic; Case/Package: 0402; Min Operating Temperature: -55°C; Max Operating Temperature: 125°C; JESD-609 Code: e3; Capacitor Type: Ceramic; Package Style: SMTMeter; Value: 1nF; Tolerance  (fill in as +-): 5%; Packaging: Tape and Reel; Tolerance (fill in as +-): 5%; Rated DC Voltage (URdc): 50V; Temperature Characteristics Code: C0G; Length: 1mm; Width: 0.5mm; Height: 0.5mm; Reach SVHC Compliant: Yes; RoHS Compliant: Yes; ComponentLink1URL: https://datasheet.ciiva.com:443/pdfs/VipMasterIC/IC/KEME/KEME-S-A0008958445/KEME-S-A0008958445-1.pdf?src-supplier=IHS+Markit; ComponentLink1Description: https://datasheet.ciiva.com:443/pdfs/VipMasterIC/IC/KEME/KEME-S-A0008958445/KEME-S-A0008958445-1.pdf?src-supplier=IHS+Markit; ComponentLink2URL: http://www.farnell.com/datasheets/2750482.pdf?src-supplier=Farnell; ComponentLink2Description: http://www.farnell.com/datasheets/2750482.pdf?src-supplier=Farnell; ComponentLink3URL: https://datasheet.octopart.com/C0402C102J5GACAUTO-KEMET-datasheet-169773461.pdf?src-supplier=Newark; ComponentLink3Description: https://datasheet.octopart.com/C0402C102J5GACAUTO-KEMET-datasheet-169773461.pdf?src-supplier=Newark; ComponentLink4URL: http://www.farnell.com/datasheets/2750482.pdf?src-supplier=Newark; ComponentLink4Description: http://www.farnell.com/datasheets/2750482.pdf?src-supplier=Newark; ComponentLink5URL: https://api.kemet.com/component-edge/download/datasheet/C0402C102J5GACAUTO.pdf?src-supplier=Digikey; ComponentLink5Description: https://api.kemet.com/component-edge/download/datasheet/C0402C102J5GACAUTO.pdf?src-supplier=Digikey; ComponentLink6URL: http://www.kemet.com/docfinder?Partnumber=C0402C102J5GACAUTO&src-supplier=Digikey; ComponentLink6Description: http://www.kemet.com/docfinder?Partnumber=C0402C102J5GACAUTO&src-supplier=Digikey; ComponentLink7URL: https://datasheet.octopart.com/C0402C102J5GACAUTO-KEMET-datasheet-130259044.pdf?src-supplier=TME; ComponentLink7Description: https://datasheet.octopart.com/C0402C102J5GACAUTO-KEMET-datasheet-130259044.pdf?src-supplier=TME
footprint C0402
pins: 1, 2

## C0402C104K3PACTU
designator C?, comment 100nF
Ceramic Capacitor, Multilayer, Ceramic, 25V, 10% +Tol, 10% -Tol, X5R, 15% TC, 0.1uF, Surface Mount, 0402; Manufacturer: KEMET; Manufacturer Part Number: C0402C104K3PACTU; Multilayer: Yes; Supplier: Mouser; Supplier Part Number: 80-C0402C104K3P; RoHS: Yes; Category: Ceramic Capacitors; Stock: 262570; Pricing: 1=0.12, 10=0.056, 50=0.056, 100=0.036, 1000=0.026, 10000=0.017 (USD); Mounting Technology: Surface Mount; Pins: 2; Dielectric Material: Ceramic; Package Shape: Rectangular; Case/Package: 0402; Terminal Finish: Nickel; Min Operating Temperature: -55°C; Max Operating Temperature: 85°C; JESD-609 Code: e3; Value: 100nF; Capacitor Type: Ceramic; Tolerance  (fill in as +-): 10%; Packaging: Tape and Reel; Tolerance (fill in as +-): 10%; Rated DC Voltage (URdc): 25V; Temperature Characteristics Code: X5R; Termination: Wraparound; Reach SVHC Compliant: Yes; RoHS Compliant: Yes; ComponentLink1URL: https://datasheet.ciiva.com:443/pdfs/VipMasterIC/IC/KEME/KEME-S-A0008991665/KEME-S-A0008991665-1.pdf?src-supplier=IHS+Markit; ComponentLink1Description: https://datasheet.ciiva.com:443/pdfs/VipMasterIC/IC/KEME/KEME-S-A0008991665/KEME-S-A0008991665-1.pdf?src-supplier=IHS+Markit; ComponentLink2URL: http://www.farnell.com/datasheets/2748284.pdf?src-supplier=Farnell; ComponentLink2Description: http://www.farnell.com/datasheets/2748284.pdf?src-supplier=Farnell; ComponentLink3URL: http://www.farnell.com/datasheets/2748284.pdf?src-supplier=Newark; ComponentLink3Description: http://www.farnell.com/datasheets/2748284.pdf?src-supplier=Newark; ComponentLink4URL: https://datasheet.octopart.com/C0402C104K3PACTU-KEMET-datasheet-181956028.pdf?src-supplier=Element14; ComponentLink4Description: https://datasheet.octopart.com/C0402C104K3PACTU-KEMET-datasheet-181956028.pdf?src-supplier=Element14
footprint C0402
pins: 1, 2

## C0402C104K4RAC-TU
designator C?, comment 0.1uF
100nF ±10% 16V X7R 0402 Multilayer Ceramic Capacitors MLCC - SMD/SMT RoHS; Manufacturer: KEMET; Manufacturer Part Number: C0402C104K4RAC-TU; Supplier: Digikey; Supplier Part Number: 399-C0402C104K4RAC7867CT-ND; RoHS: Yes; Category: Ceramic Capacitors; Stock: 2599290; Pricing: 1=0.1, 10=0.032, 50=0.0182, 100=0.0141, 500=0.0106, 1000=0.00833, 2500=0.00758, 5000=0.00697 (USD)
footprint C0402
pins: 1, 2

## C0402C105K4PAC7411
designator C?, comment 1uF
Ceramic Capacitor, Multilayer, Ceramic, 16V, 10% +Tol, 10% -Tol, X5R, 15% TC, 1uF, Surface Mount, 0402; Manufacturer: KEMET; Manufacturer Part Number: C0402C105K4PAC7411; Multilayer: Yes; Supplier: Mouser; Supplier Part Number: 80-C0402C105K4P7411; RoHS: Yes; Category: Ceramic Capacitors; Stock: 78488; Pricing: 1=0.11, 10=0.061, 50=0.061, 100=0.037, 1000=0.024, 10000=0.019 (USD); Mounting Technology: Surface Mount; Pins: 2; Dielectric Material: Ceramic; Package Shape: Rectangular; Case/Package: 0402; Min Operating Temperature: -55°C; Max Operating Temperature: 85°C; Value: 1uF; Capacitor Type: Ceramic; Tolerance  (fill in as +-): 10%; Packaging: Tape and Reel; Tolerance (fill in as +-): 10%; Rated DC Voltage (URdc): 16V; Temperature Characteristics Code: X5R; Termination: Wraparound; Reach SVHC Compliant: Yes; RoHS Compliant: Yes; ComponentLink1URL: https://datasheet.ciiva.com:443/pdfs/VipMasterIC/IC/KEME/KEME-S-A0008991665/KEME-S-A0008991665-1.pdf?src-supplier=IHS+Markit; ComponentLink1Description: https://datasheet.ciiva.com:443/pdfs/VipMasterIC/IC/KEME/KEME-S-A0008991665/KEME-S-A0008991665-1.pdf?src-supplier=IHS+Markit; ComponentLink2URL: https://api.kemet.com/component-edge/download/datasheet/C0402C105K4PAC7411.pdf?src-supplier=Digikey; ComponentLink2Description: https://api.kemet.com/component-edge/download/datasheet/C0402C105K4PAC7411.pdf?src-supplier=Digikey; ComponentLink3URL: https://datasheet.octopart.com/C0402C105K4PAC7411-KEMET-datasheet-142027389.pdf?src-supplier=Farnell; ComponentLink3Description: https://datasheet.octopart.com/C0402C105K4PAC7411-KEMET-datasheet-142027389.pdf?src-supplier=Farnell
footprint C0402
pins: 1, 2

## C0402C200F5GACTU
designator C?, comment 20pF
Ceramic Capacitor, Multilayer, Ceramic, 50V, 1% +Tol, 1% -Tol, C0G, 30ppm/Cel TC, 0.00002uF, Surface Mount, 0402; Manufacturer: KEMET; Manufacturer Part Number: C0402C200F5GACTU; Multilayer: Yes; Supplier: Mouser; Supplier Part Number: 80-C0402C200F5GACTU; RoHS: Yes; Category: Ceramic Capacitors; Stock: 12657; Pricing: 1=1.33, 10=0.87, 50=0.87, 100=0.549, 1000=0.477, 10000=0.408 (USD); Pins: 2; Dielectric Material: Ceramic; Case/Package: 0402; Terminal Finish: Nickel; Min Operating Temperature: -55°C; Max Operating Temperature: 125°C; JESD-609 Code: e3; Value: 20pF; Capacitor Type: Ceramic; Tolerance  (fill in as +-): 1%; Package Style: SMTMeter; Packaging: Tape and Reel; Tolerance (fill in as +-): 1%; Rated DC Voltage (URdc): 50V; Temperature Characteristics Code: C0G; Length: 1mm; Width: 0.5mm; Height: 0.5mm; Reach SVHC Compliant: Yes; RoHS Compliant: Yes; ComponentLink1URL: https://datasheet.ciiva.com:443/pdfs/VipMasterIC/IC/KEME/KEME-S-A0005605168/KEME-S-A0005605168-1.pdf?src-supplier=IHS+Markit; ComponentLink1Description: https://datasheet.ciiva.com:443/pdfs/VipMasterIC/IC/KEME/KEME-S-A0005605168/KEME-S-A0005605168-1.pdf?src-supplier=IHS+Markit; ComponentLink2URL: https://datasheet.octopart.com/C0402C200F5GACTU-KEMET-datasheet-149534727.pdf?src-supplier=Farnell; ComponentLink2Description: https://datasheet.octopart.com/C0402C200F5GACTU-KEMET-datasheet-149534727.pdf?src-supplier=Farnell
footprint C0402
pins: 1, 2

## C0402C223J5RACTU
designator C?, comment 22nF
Ceramic Capacitor, Multilayer, Ceramic, 50V, 5% +Tol, 5% -Tol, X7R, 15% TC, 0.022uF, Surface Mount, 0402; Manufacturer: KEMET; Manufacturer Part Number: C0402C223J5RACTU; Multilayer: Yes; Supplier: Mouser; Supplier Part Number: 80-C0402C223J5RACTU; RoHS: Yes; Category: Ceramic Capacitors; Stock: 18324; Pricing: 1=0.3, 10=0.185, 50=0.185, 100=0.12, 1000=0.087, 10000=0.063 (USD); Mounting Technology: Surface Mount; Pins: 2; Dielectric Material: Ceramic; Package Shape: Rectangular; Case/Package: 0402; Terminal Finish: Nickel; Min Operating Temperature: -55°C; Max Operating Temperature: 125°C; JESD-609 Code: e3; Value: 22nF; Capacitor Type: Ceramic; Tolerance  (fill in as +-): 5%; Package Style: SMTMeter; Packaging: Tape and Reel; Tolerance (fill in as +-): 5%; Rated DC Voltage (URdc): 50V; Temperature Characteristics Code: X7R; Termination: Wraparound; Length: 1mm; Width: 0.5mm; Height: 0.5mm; Reach SVHC Compliant: Yes; RoHS Compliant: Yes; ComponentLink1URL: https://datasheet.ciiva.com:443/pdfs/VipMasterIC/IC/KEME/KEME-S-A0008991654/KEME-S-A0008991654-1.pdf?src-supplier=IHS+Markit; ComponentLink1Description: https://datasheet.ciiva.com:443/pdfs/VipMasterIC/IC/KEME/KEME-S-A0008991654/KEME-S-A0008991654-1.pdf?src-supplier=IHS+Markit; ComponentLink2URL: http://capacitoredge.kemet.com/capedge2/DataSheet?pn=C0402C223J5RAC7867&src-supplier=Avnet; ComponentLink2Description: http://capacitoredge.kemet.com/capedge2/DataSheet?pn=C0402C223J5RAC7867&src-supplier=Avnet
footprint C0402
pins: 1, 2

## C0402C224K9PAC7411
designator C?, comment 220nF
Ceramic Capacitor, Multilayer, Ceramic, 6.3V, 10% +Tol, 10% -Tol, X5R, 15% TC, 0.22uF, Surface Mount, 0402; Manufacturer: KEMET; Manufacturer Part Number: C0402C224K9PAC7411; Multilayer: Yes; Supplier: Mouser; Supplier Part Number: 80-C0402C224K9PACLR; RoHS: Yes; Category: Ceramic Capacitors; Stock: 143956; Pricing: 1=0.1, 10=0.018, 50=0.018, 100=0.015, 1000=0.015, 10000=0.015 (USD); Mounting Technology: Surface Mount; Pins: 2; Dielectric Material: Ceramic; Package Shape: Rectangular; Case/Package: 0402; Terminal Finish: Nickel; Min Operating Temperature: -55°C; Max Operating Temperature: 85°C; JESD-609 Code: e3; Value: 220nF; Capacitor Type: Ceramic; Tolerance  (fill in as +-): 10%; Package Style: SMTMeter; Packaging: Tape and Reel; Tolerance (fill in as +-): 10%; Rated DC Voltage (URdc): 6.3V; Temperature Characteristics Code: X5R; Termination: Wraparound; Length: 1mm; Width: 0.5mm; Height: 0.5mm; Reach SVHC Compliant: Yes; RoHS Compliant: Yes; ComponentLink1URL: https://datasheet.ciiva.com:443/pdfs/VipMasterIC/IC/KEME/KEME-S-A0008991665/KEME-S-A0008991665-1.pdf?src-supplier=IHS+Markit; ComponentLink1Description: https://datasheet.ciiva.com:443/pdfs/VipMasterIC/IC/KEME/KEME-S-A0008991665/KEME-S-A0008991665-1.pdf?src-supplier=IHS+Markit; ComponentLink2URL: http://capacitoredge.kemet.com/capedge2/DataSheet?pn=C0402C224K9PAC7411&src-supplier=Avnet; ComponentLink2Description: http://capacitoredge.kemet.com/capedge2/DataSheet?pn=C0402C224K9PAC7411&src-supplier=Avnet; ComponentLink3URL: https://datasheet.octopart.com/C0402C224K9PAC7411-KEMET-datasheet-182899637.pdf?src-supplier=Farnell; ComponentLink3Description: https://datasheet.octopart.com/C0402C224K9PAC7411-KEMET-datasheet-182899637.pdf?src-supplier=Farnell
footprint C0402
pins: 1, 2